# Altium footprint library SN74LVC1G74DCUR.PcbLib: 3 footprints
Each footprint in its own frame and in the unit in brackets; x right, y up, seen from the top. Pads: shape width x height; smd on the part's side, far side on the other; paste and mask are expansions set on the pad; w line width, h text height; cw(c..) or ccw(c..) is an arc to the next point about the centre after c.
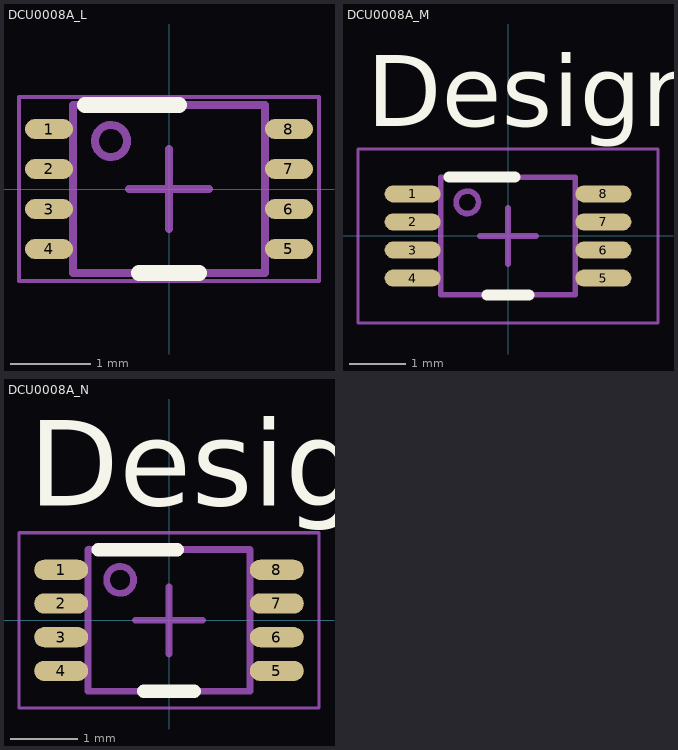
[diagram p0: the footprints below, top view; thin cyan lines are the x and y axes]

## DCU0008A_L [mm] "TI DCU0008A VSSOP-8 (US8), 2.0 x 2.3 mm body, 0.5 mm pitch. 3D model: SN74LVC1G74DCUR.stp (TI), least density"
height 0.9
pads (8):
  oval 0.6x0.25 smd paste+0 mask+0.051: 1(-1.5,0.75) 2(-1.5,0.25) 3(-1.5,-0.25) 4(-1.5,-0.75) 5(1.5,-0.75) 6(1.5,-0.25) 7(1.5,0.25) 8(1.5,0.75)
Top Overlay:
  lines w0.2: -1.05,1.05 0.125,1.05 ; -0.375,-1.05 0.375,-1.05
  text "." at -1.905,1.143 h0.25
Mechanical 13:
  circle w0.1: c-0.725,0.6 r0.2
  lines w0.1: -1.2,-1.05 -1.2,1.05 1.2,1.05 1.2,-1.05 -1.2,-1.05
Mechanical 15:
  lines w0.05: -1.875,-1.15 -1.875,1.15 1.875,1.15 1.875,-1.15 -1.875,-1.15
  lines w0.1: -0.5,0 0.5,0 ; 0,-0.5 0,0.5
3D body "DCU0008A.stp": height 0.77, standoff 0, extent -1.55,-1 1.55,1

## DCU0008A_M [mm] "TI DCU0008A VSSOP-8 (US8), 2.0 x 2.3 mm body, 0.5 mm pitch. 3D model: SN74LVC1G74DCUR.stp (TI), most density"
height 0.9
pads (8):
  oval 1x0.3 smd paste+0 mask+0.051: 1(-1.7,0.75) 2(-1.7,0.25) 3(-1.7,-0.25) 4(-1.7,-0.75) 5(1.7,-0.75) 6(1.7,-0.25) 7(1.7,0.25) 8(1.7,0.75)
Top Overlay:
  lines w0.2: -1.05,1.05 0.125,1.05 ; -0.375,-1.05 0.375,-1.05
  text "Designator9" at -2.515,1.956 h1.27
  text ".Designator" at -3.492,-0.635 h1.27
Mechanical 13:
  circle w0.1: c-0.725,0.6 r0.2
  lines w0.1: -1.2,-1.05 1.2,-1.05 1.2,1.05 -1.2,1.05 -1.2,-1.05
  text ".Designator" at -3.492,-0.635 h1.27
Mechanical 15:
  lines w0.05: -2.675,-1.55 -2.675,1.55 2.675,1.55 2.675,-1.55 -2.675,-1.55
  lines w0.1: -0.5,0 0.5,0 ; 0,-0.5 0,0.5
3D body "SN74LVC1G74DCUR.stp": height 0.77, standoff 0, extent -1.55,-1 1.55,1

## DCU0008A_N [mm] "TI DCU0008A VSSOP-8 (US8), 2.0 x 2.3 mm body, 0.5 mm pitch. 3D model: SN74LVC1G74DCUR.stp (TI), nominal density"
height 0.9
pads (8):
  oval 0.8x0.3 smd paste+0 mask+0.051: 1(-1.6,0.75) 2(-1.6,0.25) 3(-1.6,-0.25) 4(-1.6,-0.75) 5(1.6,-0.75) 6(1.6,-0.25) 7(1.6,0.25) 8(1.6,0.75)
Top Overlay:
  lines w0.2: -1.05,1.05 0.125,1.05 ; -0.375,-1.05 0.375,-1.05
  text "Designator9" at -2.083,1.702 h1.27
  text ".Designator" at -3.492,-0.635 h1.27
Mechanical 13:
  circle w0.1: c-0.725,0.6 r0.2
  lines w0.1: -1.2,-1.05 1.2,-1.05 1.2,1.05 -1.2,1.05 -1.2,-1.05
  text ".Designator" at -3.492,-0.635 h1.27
Mechanical 15:
  lines w0.05: -2.225,-1.3 -2.225,1.3 2.225,1.3 2.225,-1.3 -2.225,-1.3
  lines w0.1: -0.5,0 0.5,0 ; 0,-0.5 0,0.5
3D body "SN74LVC1G74DCUR.stp": height 0.77, standoff 0, extent -1.55,-1 1.55,1